# Altium schematic symbol library RT0805DRE0720RL.SchLib: 1 symbol
Pins are listed as number, name and electrical type; pins without a type are passive.

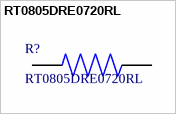
[diagram p0: symbol RT0805DRE0720RL]

## RT0805DRE0720RL
designator R?
20 Ohms ±0.5% 0.125W, 1/8W Chip Resistor 0805 (2012 Metric) Thin Film; Manufacturer_Name: Yageo; Copyright: Copyright (C) 2026 Ultra Librarian. All rights reserved.; Manufacturer_Part_Number: RT0805DRE0720RL
footprint RC0805N_YAG
pins: 1, 2